# Altium footprint library TIE_2023_PcbLib.PcbLib: 17 footprints (part 1 of 2)
Each footprint in its own frame and in the unit in brackets; x right, y up, seen from the top. Pads: shape width x height; smd on the part's side, far side on the other; paste and mask are expansions set on the pad; w line width, h text height; cw(c..) or ccw(c..) is an arc to the next point about the centre after c.
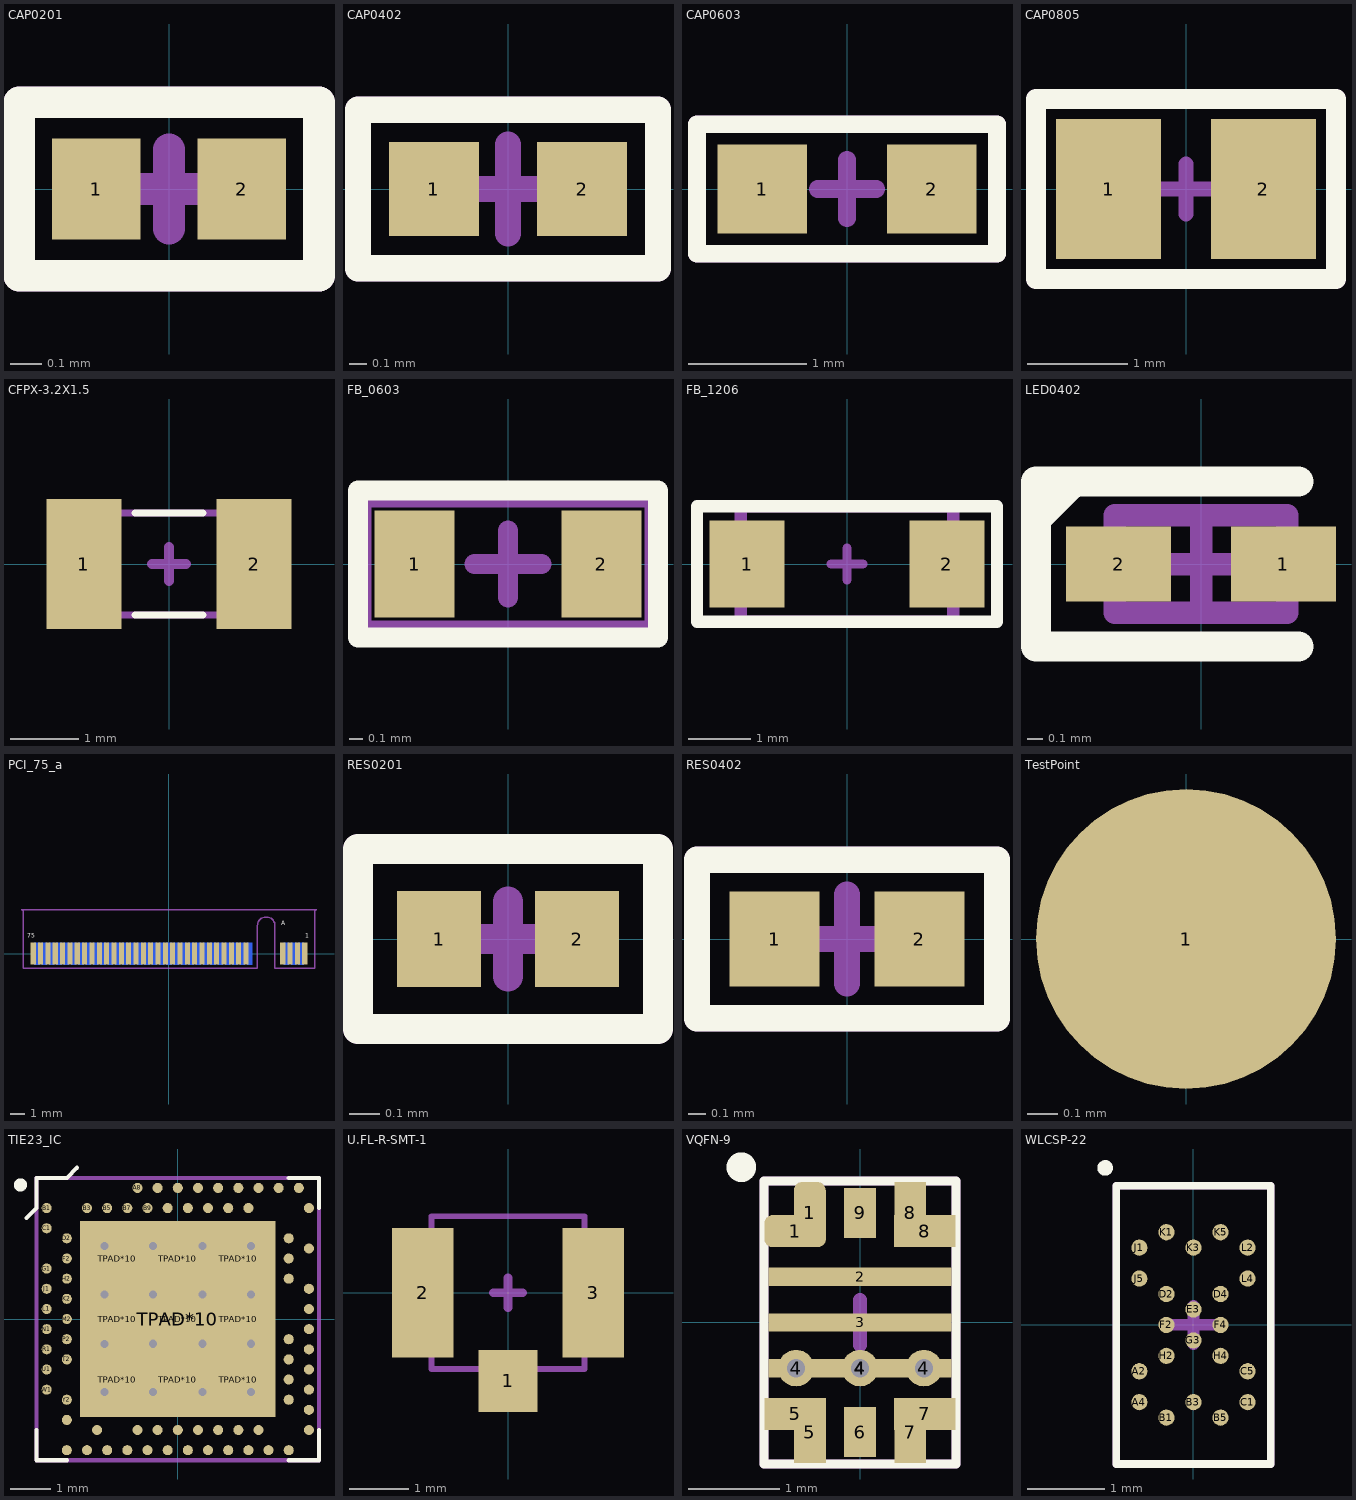
[diagram p0: the footprints below, top view; thin cyan lines are the x and y axes]

## CAP0201 [mm]
pads (2):
  rect 0.28x0.32 smd mask+0.05: 1(-0.23,0) 2(0.23,0)
Top Overlay:
  lines w0.1: -0.475,-0.275 0.475,-0.275 0.475,0.275 -0.475,0.275 -0.475,-0.275
Mechanical 10:
  lines w0.1: -0.475,-0.275 -0.475,0.275 0.475,0.275 0.475,-0.275 -0.475,-0.275
Mechanical 12:
  lines w0.1: -0.125,0 0.125,0 ; 0,-0.125 0,0.125
3D body "CBR02C150F5GAC.stp": height 0.33, standoff 0, extent -0.3,-0.15 0.3,0.15

## CAP0402 [mm]
pads (2):
  rect 0.51x0.535 smd mask+0.05: 1(-0.42,0) 2(0.42,0)
Top Overlay:
  lines w0.15: -0.85,-0.45 0.85,-0.45 0.85,0.45 -0.85,0.45 -0.85,-0.45
Mechanical 10:
  lines w0.15: -0.85,-0.45 0.85,-0.45 0.85,0.45 -0.85,0.45 -0.85,-0.45
Mechanical 12:
  lines w0.15: -0.25,0 0.25,0 ; 0,-0.25 0,0.25
3D body "Ceramic_Capacitor_0402_h20mil.step": height 0.51, standoff 0, extent -0.508,-0.254 0.508,0.254

## CAP0603 [mm]
pads (2):
  rect 0.76x0.76 smd mask+0.05: 1(-0.72,0) 2(0.72,0)
Top Overlay:
  lines w0.15: -1.275,-0.55 -1.275,0.55 1.275,0.55 1.275,-0.55 -1.275,-0.55
Mechanical 10:
  lines w0.15: -1.275,-0.55 -1.275,0.55 1.275,0.55 1.275,-0.55 -1.275,-0.55
Mechanical 12:
  lines w0.15: -0.25,0 0.25,0 ; 0,-0.25 0,0.25
3D body "Ceramic_Capacitor_0603_h32mil.step": height 0.8, standoff 0, extent -0.8,-0.4 0.8,0.4

## CAP0805 [mm]
pads (2):
  rect 1.05x1.4 smd mask+0.05: 1(-0.775,0) 2(0.775,0)
Top Overlay:
  lines w0.2: -1.5,-0.9 1.5,-0.9 1.5,0.9 -1.5,0.9 -1.5,-0.9
Mechanical 10:
  lines w0.2: -1.5,-0.9 -1.5,0.9 1.5,0.9 1.5,-0.9 -1.5,-0.9
Mechanical 12:
  lines w0.15: -0.25,0 0.25,0 ; 0,-0.25 0,0.25
3D body "Ceramic_Capacitor_0805_h50mil.step": height 1.26, standoff 0.01, extent -1,-0.625 1,0.625

## CFPX-3.2X1.5 [mm] "32kHz Crystal"
pads (2):
  rect 1.1x1.9 smd mask+0.05: 1(-1.25,0) 2(1.25,0)
Top Overlay:
  lines w0.1: -0.5,-0.75 0.5,-0.75 ; -0.5,0.75 0.5,0.75
Top Component Center:
  lines w0.15: -0.25,0 0.25,0 ; 0,-0.25 0,0.25
Top Assembly:
  lines w0.1: -1.6,-0.75 -1.6,0.75 1.6,0.75 1.6,-0.75 -1.6,-0.75
  text ".Designator" at -0.475,0 h0.3
3D body: height 1, standoff 0, extent -1.6,-1.25 1.6,1.25

## FB_0603 [mm]
pads (2):
  rect 0.6x0.8 smd mask+0.05: 1(-0.7,0) 2(0.7,0)
Top Overlay:
  lines w0.15: -1.125,-0.55 1.125,-0.55 1.125,0.55 -1.125,0.55 -1.125,-0.55
Top Component Center:
  lines w0.15: -0.25,0 0.25,0 ; 0,-0.25 0,0.25
Top Assembly:
  lines w0.15: -1.1,-0.5 1.1,-0.5 1.1,0.5 -1.1,0.5 -1.1,-0.5
  text ".Designator" at -0.475,0 h0.3
3D body "0603_RES.stp": height 0.46, standoff 0, extent -0.8,-0.4 0.8,0.4

## FB_1206 [mm]
pads (2):
  rect 1.2x1.4 smd mask+0.05: 1(-1.6,0) 2(1.6,0)
Top Overlay:
  lines w0.2: -2.4,-0.925 -2.4,0.925 2.4,0.925 2.4,-0.925 -2.4,-0.925
Top Component Center:
  lines w0.15: -0.25,0 0.25,0 ; 0,-0.25 0,0.25
Top Assembly:
  lines w0.2: -1.7,-0.925 -1.7,0.925 1.7,0.925 1.7,-0.925 -1.7,-0.925
  text ".Designator" at -0.475,0 h0.3
3D body "CRCW12060000Z0EAC.stp": height 0.6, standoff 0, extent -1.575,-0.8 1.575,0.8

## LED0402 [mm]
pads (2):
  rect 0.7x0.5 smd mask+0.05: 1(0.55,0) 2(-0.55,0)
Top Overlay:
  lines w0.2: -1.087,0.312 -0.875,0.525 ; 0.65,-0.547 -1.1,-0.547 -1.1,0.55 0.65,0.55
  text "." at -1.344,-0.048 h0.6
Mechanical 10:
  lines w0.15: -0.575,-0.325 0.575,-0.325 0.575,0.325 -0.575,0.325 -0.575,-0.325
Mechanical 12:
  lines w0.15: -0.25,0 0.25,0 ; 0,-0.25 0,0.25
3D body "ChipLedWith-Green.stp": height 0.16, standoff 0, extent -0.502,-0.252 0.502,0.252

## PCI_75_a [mm]
pads (67):
  rect 0.35x1.5 smd mask+0: 1(9.25,0) 3(8.75,0) 5(8.25,0) 7(7.75,0) 17(5.25,0) 19(4.75,0) 21(4.25,0) 23(3.75,0) 25(3.25,0) 27(2.75,0) 29(2.25,0) 31(1.75,0) 33(1.25,0) 35(0.75,0) 37(0.25,0) 39(-0.25,0) 41(-0.75,0) 43(-1.25,0) 45(-1.75,0) 47(-2.25,0) 49(-2.75,0) 51(-3.25,0) 53(-3.75,0) 55(-4.25,0) 57(-4.75,0) 59(-5.25,0) 61(-5.75,0) 63(-6.25,0) 65(-6.75,0) 67(-7.25,0) 69(-7.75,0) 71(-8.25,0) 73(-8.75,0) 75(-9.25,0)
  rect 0.35x1.5 smd far side mask+0: 2(9,0) 4(8.5,0) 6(8,0) 16(5.5,0) 18(5,0) 20(4.5,0) 22(4,0) 24(3.5,0) 26(3,0) 28(2.5,0) 30(2,0) 32(1.5,0) 34(1,0) 36(0.5,0) 38(0,0) 40(-0.5,0) 42(-1,0) 44(-1.5,0) 46(-2,0) 48(-2.5,0) 50(-3,0) 52(-3.5,0) 54(-4,0) 56(-4.5,0) 58(-5,0) 60(-5.5,0) 62(-6,0) 64(-6.5,0) 66(-7,0) 68(-7.5,0) 70(-8,0) 72(-8.5,0) 74(-9,0)
Top Overlay:
  text "A" at 7.65,1.95 h0.3
  text "1" at 9.275,1.1 h0.3
  text "75" at -9.65,1.1 h0.3
Bottom Overlay:
  text "2" at 9.075,1.1 h0.3
  text "74" at -8.45,1.1 h0.3
Top Solder:
  rectangle: 7.5,-0.8 9.5,0.8
  rectangle: -9.5,-0.8 5.5,0.8
Bottom Solder:
  rectangle: -9.25,-0.8 5.75,0.8
  rectangle: 7.75,-0.8 9.25,0.8
Top Component Center:
  lines w0.15: -0.25,-0.016 0.25,-0.016 ; 0,-0.266 0,0.234
Top Assembly:
  lines w0.1: 6.025,1.894 6.025,-1 -9.925,-1 ; 6.025,1.9 cw(c6.625,1.9) 7.225,1.9 7.225,-1 9.925,-1 9.925,2.85 cw(c10.075,2.85) 10.075,3 -10.075,3 cw(c-10.075,2.85) -9.925,2.85 -9.925,-1 ; -9.925,-1 ccw(c-9.925,-1) -9.925,-1
  text "'.Designator'" at -0.475,1 h0.3

## RES0201 [mm]
pads (2):
  rect 0.28x0.32 smd mask+0.05: 1(-0.23,0) 2(0.23,0)
Top Overlay:
  lines w0.1: -0.5,-0.3 -0.5,0.3 0.5,0.3 0.5,-0.3 -0.5,-0.3
Mechanical 10:
  lines w0.1: -0.5,-0.3 0.5,-0.3 0.5,0.3 -0.5,0.3 -0.5,-0.3
Mechanical 12:
  lines w0.1: -0.125,0 0.125,0 ; 0,-0.125 0,0.125
3D body "User Library-res0201-1.step": height 0.23, standoff 0, extent -0.3,-0.15 0.3,0.15

## RES0402 [mm]
pads (2):
  rect 0.51x0.54 smd mask+0.05: 1(-0.41,0) 2(0.41,0)
Top Overlay:
  lines w0.15: -0.85,-0.45 0.85,-0.45 0.85,0.45 -0.85,0.45 -0.85,-0.45
Mechanical 10:
  lines w0.15: -0.85,-0.45 0.85,-0.45 0.85,0.45 -0.85,0.45 -0.85,-0.45
Mechanical 12:
  lines w0.15: -0.25,0 0.25,0 ; 0,-0.25 0,0.25
3D body "User Library-CR1005-0402.STEP": height 0.35, standoff 0, extent -0.5,-0.25 0.5,0.25

## TestPoint [mm]
pads (1):
  round 1 smd paste-10 mask+0.1: 1(0,0)
Mechanical 12:
  lines w0.15: -0.25,0 0.25,0 ; 0,-0.25 0,0.25

## TIE23_IC [mm]
pads (99):
  round 0.25 smd mask+0.05: A8(-1,3.25) A10(-0.5,3.25) A12(0,3.25) A14(0.5,3.25) A16(1,3.25) A18(1.5,3.25) A20(2,3.25) A22(2.5,3.25) A23(3,3.25) AA24(3.25,-2.25) AB2(-2.75,-2.5) AC5(-2,-2.75) AC9(-1,-2.75) AC11(-0.5,-2.75) AC13(0,-2.75) AC15(0.5,-2.75) AC17(1,-2.75) AC19(1.5,-2.75) AC21(2,-2.75) AC24(3.25,-2.75) AD2(-2.75,-3.25) AD4(-2.25,-3.25) AD6(-1.75,-3.25) AD8(-1.25,-3.25) AD10(-0.75,-3.25) AD12(-0.25,-3.25) AD14(0.25,-3.25) AD16(0.75,-3.25) AD18(1.25,-3.25) AD20(1.75,-3.25) AD22(2.25,-3.25) AD23(2.75,-3.25) B1(-3.25,2.75) B3(-2.25,2.75) B5(-1.75,2.75) B7(-1.25,2.75) B9(-0.75,2.75) B11(-0.25,2.75) B13(0.25,2.75) B15(0.75,2.75) B17(1.25,2.75) B19(1.75,2.75) B24(3.25,2.75) C1(-3.25,2.25) D2(-2.75,2) D23(2.75,2) E24(3.25,1.75) F2(-2.75,1.5) F23(2.75,1.5) G1(-3.25,1.25) H2(-2.75,1) H23(2.75,1) J1(-3.25,0.75) J24(3.25,0.75) K2(-2.75,0.5) L1(-3.25,0.25) L24(3.25,0.25) M2(-2.75,0) N1(-3.25,-0.25) N24(3.25,-0.25) P2(-2.75,-0.5) P23(2.75,-0.5) R1(-3.25,-0.75) R24(3.25,-0.75) T2(-2.75,-1) T23(2.75,-1) U1(-3.25,-1.25) U24(3.25,-1.25) V23(2.75,-1.5) W1(-3.25,-1.75) W24(3.25,-1.75) Y2(-2.75,-2) Y23(2.75,-2)
  round 0.4 hole 0.2 mask+0.075: TPAD*10(-1.813,-1.813) TPAD*10(-1.813,-0.614) TPAD*10(-1.813,0.613) TPAD*10(-1.813,1.813) TPAD*10(-0.613,-1.813) TPAD*10(-0.613,-0.613) TPAD*10(-0.613,0.614) TPAD*10(-0.613,1.813) TPAD*10(0.613,-1.813) TPAD*10(0.613,-0.613) TPAD*10(0.613,0.614) TPAD*10(0.613,1.813) TPAD*10(1.813,-1.813) TPAD*10(1.813,-0.613) TPAD*10(1.813,0.614) TPAD*10(1.813,1.813)
  rect 1.2x1.2 on Top Paste mask+0.05: TPAD*10(-1.5,-1.5) TPAD*10(-1.5,0) TPAD*10(-1.5,1.5) TPAD*10(0,-1.5) TPAD*10(0,0) TPAD*10(0,1.5) TPAD*10(1.5,-1.5) TPAD*10(1.5,0) TPAD*10(1.5,1.5)
  rect 4.85x4.85 smd paste-4 mask+0.05: TPAD*10(0,0)
Top Overlay:
  circle w0.254: c-3.9,3.325 r0.035
  lines w0.1: -3.75,2.5 -3.5,2.75 -3.5,3.5 -2.75,3.5 -2.5,3.75 ; -3.5,-2.75 -3.5,-3.5 -2.75,-3.5 ; 2.75,-3.5 3.5,-3.5 3.5,-2.75 ; 2.75,3.5 3.5,3.5 3.5,2.75
Top Component Center:
  lines w0.15: -0.25,-0.006 0.25,-0.006 ; 0,-0.256 0,0.244
Top Assembly:
  lines w0.1: -3.5,-3.5 -3.5,3.5 3.5,3.5 3.5,-3.5 -3.5,-3.5
  text ".Designator" at -0.475,0 h0.3

## U.FL-R-SMT-1 [mm]
pads (3):
  rect 1x1.05 smd mask+0.05: 1(0,-1.5)
  rect 1.05x2.2 smd mask+0.05: 2(-1.45,0) 3(1.45,0)
Top Component Center:
  lines w0.15: -0.25,0 0.25,0 ; 0,-0.25 0,0.25
Top Assembly:
  lines w0.1: -1.3,-1.3 -1.3,1.3 1.3,1.3 1.3,-1.3 -1.3,-1.3
  text ".Designator" at -0.475,0 h0.3

## VQFN-9 [mm]
pads (16):
  rrect50% 0.675x0.35 smd mask+0.05: 1(-0.71,1)
  rrect50% 0.35x0.675 smd mask+0.05: 1(-0.55,1.2)
  rect 2x0.2 smd mask+0.05: 2(0,0.5) 3(0,0) 4(0,-0.5)
  round 0.4 hole 0.2 mask+0.075: 4(-0.7,-0.5) 4(0,-0.5) 4(0.7,-0.5)
  rect 0.675x0.35 smd mask+0.05: 5(-0.71,-1) 7(0.71,-1) 8(0.71,1)
  rect 0.35x0.675 smd mask+0.05: 5(-0.55,-1.2) 7(0.55,-1.2) 8(0.55,1.2)
  rect 0.35x0.55 smd mask+0.05: 6(0,-1.2) 9(0,1.2)
Top Overlay:
  circle w0.254: c-1.3,1.7 r0.035
  lines w0.1: -1.05,-1.55 1.05,-1.55 1.05,1.55 -1.05,1.55 -1.05,-1.55
Top Component Center:
  lines w0.15: -0.25,0 0.25,0 ; 0,-0.25 0,0.25
Top Assembly:
  lines w0.1: -1.05,-1.55 -1.05,1.55 1.05,1.55 1.05,-1.55 -1.05,-1.55
  text ".Designator" at -0.475,0 h0.3

## WLCSP-22 [mm]
pads (22):
  round 0.21 smd mask+0.05: A2(-0.7,-0.6) A4(-0.7,-1) B1(-0.35,-1.2) B3(0,-1) B5(0.35,-1.2) C1(0.7,-1) C5(0.7,-0.6) D2(-0.35,0.4) D4(0.35,0.4) E3(0,0.2) F2(-0.35,0) F4(0.35,0) G3(0,-0.2) H2(-0.35,-0.4) H4(0.35,-0.4) J1(-0.7,1) J5(-0.7,0.6) K1(-0.35,1.2) K3(0,1) K5(0.35,1.2) L2(0.7,1) L4(0.7,0.6)
Top Overlay:
  circle w0.1: c-1.143,2.032 r0.051
  lines w0.1: -1,-1.8 1,-1.8 1,1.8 -1,1.8 -1,-1.8
Top Component Center:
  lines w0.15: -0.25,0 0.25,0 ; 0,-0.25 0,0.25
Top Assembly:
  lines w0.1: -1,-1.8 1,-1.8 1,1.8 -1,1.8 -1,-1.8
  text ".Designator" at -0.475,0 h0.3